# Altium footprint library ICs_VendorSpecific.PcbLib: 247 footprints (part 13 of 19)
Each footprint in its own frame and in the unit in brackets; x right, y up, seen from the top. Pads: shape width x height; smd on the part's side, far side on the other; paste and mask are expansions set on the pad; w line width, h text height; cw(c..) or ccw(c..) is an arc to the next point about the centre after c.
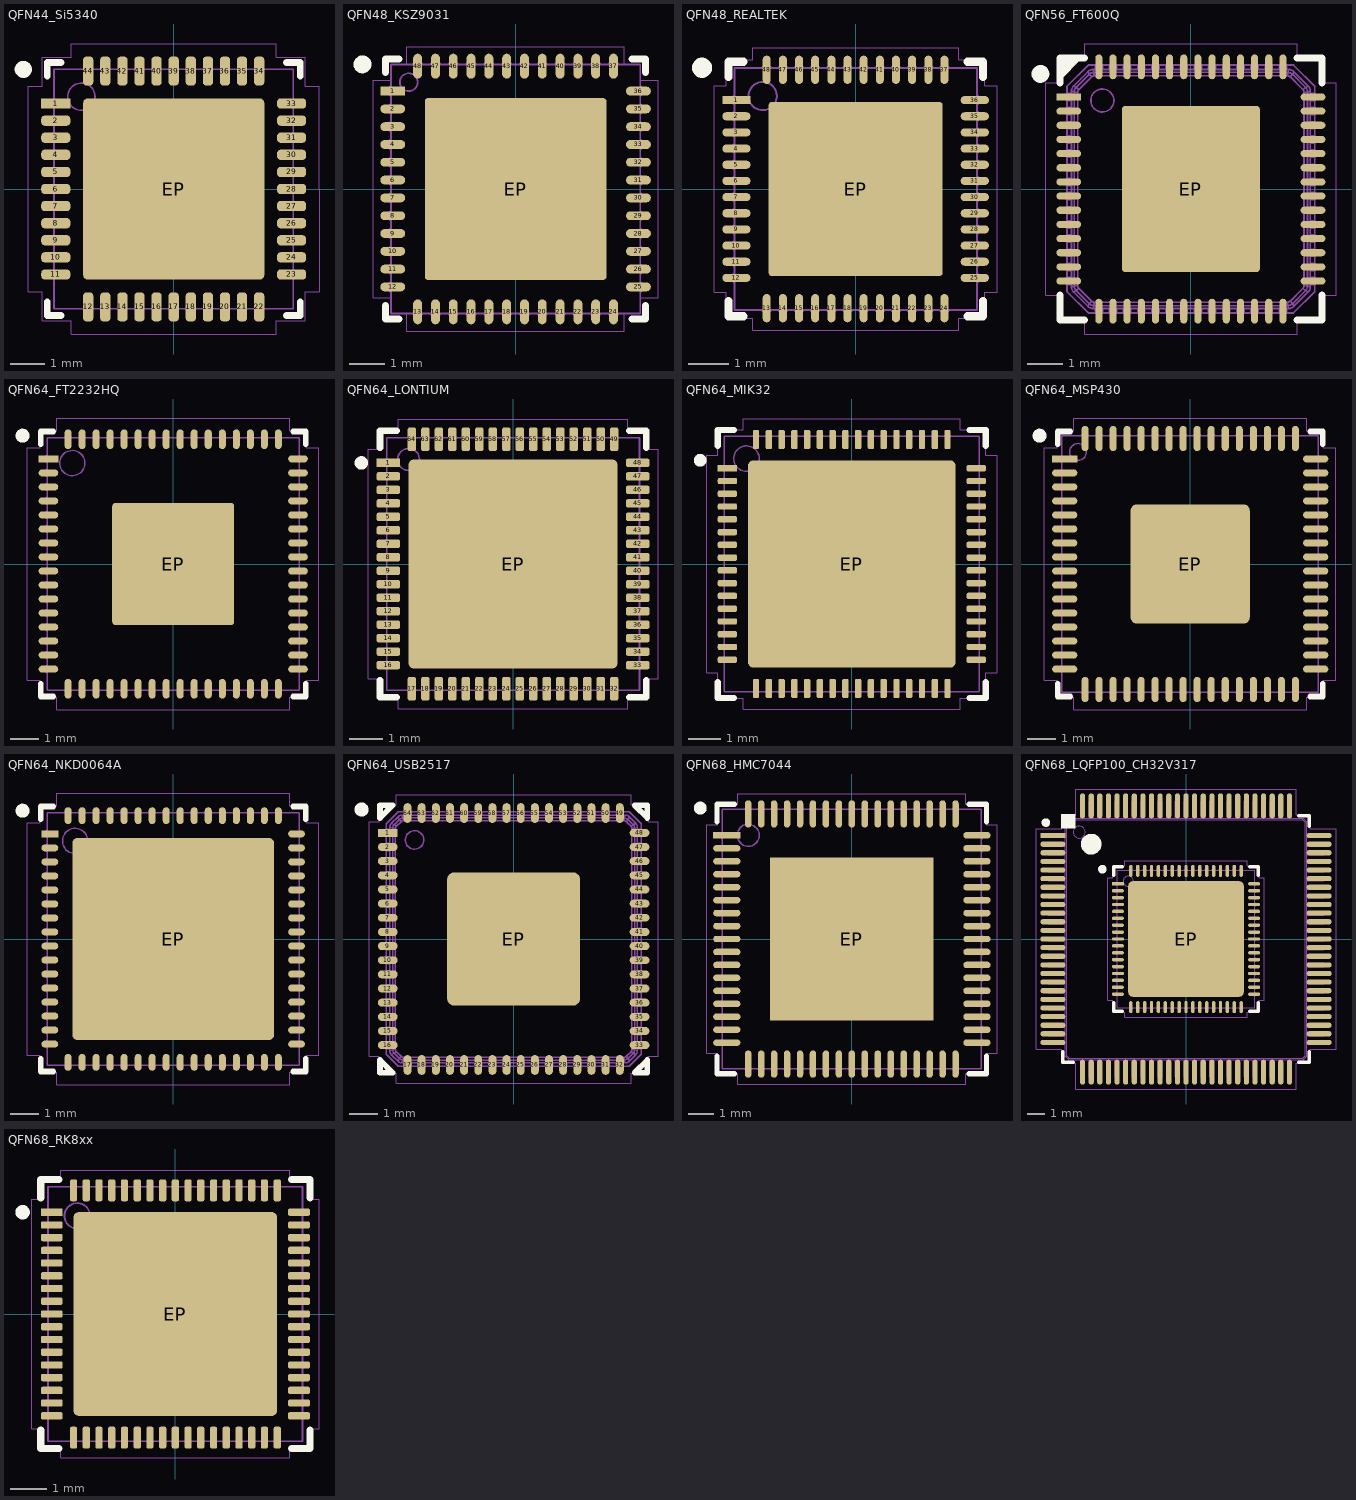
[diagram p12: the footprints below, top view; thin cyan lines are the x and y axes]

## QFN44_Si5340 [mm] "QFN, 44-Leads, Body 7x7mm, Pitch 0.50mm, Thermal Pad 5.20x5.20mm"
height 0.85
pads (45):
  rect 0.85x0.3 smd mask+0.05: 1(-3.45,2.5)
  rrect70% 0.85x0.3 smd mask+0.05: 2(-3.45,2) 3(-3.45,1.5) 4(-3.45,1) 5(-3.45,0.5) 6(-3.45,0) 7(-3.45,-0.5) 8(-3.45,-1) 9(-3.45,-1.5) 10(-3.45,-2) 11(-3.45,-2.5) 23(3.45,-2.5) 24(3.45,-2) 25(3.45,-1.5) 26(3.45,-1) 27(3.45,-0.5) 28(3.45,0) 29(3.45,0.5) 30(3.45,1) 31(3.45,1.5) 32(3.45,2) 33(3.45,2.5)
  rrect70% 0.3x0.85 smd mask+0.05: 12(-2.5,-3.45) 13(-2,-3.45) 14(-1.5,-3.45) 15(-1,-3.45) 16(-0.5,-3.45) 17(0,-3.45) 18(0.5,-3.45) 19(1,-3.45) 20(1.5,-3.45) 21(2,-3.45) 22(2.5,-3.45) 34(2.5,3.45) 35(2,3.45) 36(1.5,3.45) 37(1,3.45) 38(0.5,3.45) 39(0,3.45) 40(-0.5,3.45) 41(-1,3.45) 42(-1.5,3.45) 43(-2,3.45) 44(-2.5,3.45)
  rrect5% 5.3x5.3 smd paste-5 mask+0.05: EP(0,0)
Top Overlay:
  circle w0.25: c-4.4,3.5 r0.125
  lines w0.2: -3.7,-3.3 -3.7,-3.7 -3.3,-3.7 ; -3.7,3.3 -3.7,3.7 -3.3,3.7 ; 3.3,-3.7 3.7,-3.7 3.7,-3.3 ; 3.3,3.7 3.7,3.7 3.7,3.3
Top Paste:
  region: 1.15,-1.15 1.15,-0.15 0.15,-0.15 0.15,-1.15
  region: -0.15,-1.15 -0.15,-0.15 -1.15,-0.15 -1.15,-1.15
  region: -1.45,-1.15 -1.45,-0.15 -2.45,-0.15 -2.45,-1.15
  region: 2.45,-1.15 2.45,-0.15 1.45,-0.15 1.45,-1.15
  region: 1.15,0.15 1.15,1.15 0.15,1.15 0.15,0.15
  region: -0.15,0.15 -0.15,1.15 -1.15,1.15 -1.15,0.15
  region: -1.45,0.15 -1.45,1.15 -2.45,1.15 -2.45,0.15
  region: 2.45,0.15 2.45,1.15 1.45,1.15 1.45,0.15
  region: 1.15,1.45 1.15,2.45 0.15,2.45 0.15,1.45
  region: -0.15,1.45 -0.15,2.45 -1.15,2.45 -1.15,1.45
  region: -1.45,1.45 -1.45,2.45 -2.45,2.45 -2.45,1.45
  region: 2.45,1.45 2.45,2.45 1.45,2.45 1.45,1.45
  region: 1.15,-2.45 1.15,-1.45 0.15,-1.45 0.15,-2.45
  region: -0.15,-2.45 -0.15,-1.45 -1.15,-1.45 -1.15,-2.45
  region: -1.45,-2.45 -1.45,-1.45 -2.45,-1.45 -2.45,-2.45
  region: 2.45,-2.45 2.45,-1.45 1.45,-1.45 1.45,-2.45
Top Courtyard:
  lines w0.025: -4.25,-3 -4.25,3 -3.85,3 -3.85,3.85 -3,3.85 -3,4.25 3,4.25 3,3.85 3.85,3.85 3.85,3 4.25,3 4.25,-3 3.85,-3 3.85,-3.85 3,-3.85 3,-4.25 -3,-4.25 -3,-3.85 -3.85,-3.85 -3.85,-3 -4.25,-3
Top Assembly:
  circle w0.05: c-2.7,2.7 r0.4
  lines w0.05: -3.5,-2.625 -3.52,-2.625 -3.52,-2.375 -3.5,-2.375 ; -3.5,-2.125 -3.52,-2.125 -3.52,-1.875 -3.5,-1.875 ; -3.5,-1.625 -3.52,-1.625 -3.52,-1.375 -3.5,-1.375 ; -3.5,-1.125 -3.52,-1.125 -3.52,-0.875 -3.5,-0.875 ; -3.5,-0.625 -3.52,-0.625 -3.52,-0.375 -3.5,-0.375 ; -3.5,-0.125 -3.52,-0.125 -3.52,0.125 -3.5,0.125 ; -3.5,0.375 -3.52,0.375 -3.52,0.625 -3.5,0.625 ; -3.5,0.875 -3.52,0.875 -3.52,1.125 -3.5,1.125 ; -3.5,1.375 -3.52,1.375 -3.52,1.625 -3.5,1.625 ; -3.5,1.875 -3.52,1.875 -3.52,2.125 -3.5,2.125 ; -3.5,2.375 -3.52,2.375 -3.52,2.625 -3.5,2.625 ; -2.625,-3.5 -2.625,-3.52 -2.375,-3.52 -2.375,-3.5 ; -2.625,3.5 -2.625,3.52 -2.375,3.52 -2.375,3.5 ; -2.125,-3.5 -2.125,-3.52 -1.875,-3.52 -1.875,-3.5 ; -2.125,3.5 -2.125,3.52 -1.875,3.52 -1.875,3.5 ; -1.625,-3.5 -1.625,-3.52 -1.375,-3.52 -1.375,-3.5 ; -1.625,3.5 -1.625,3.52 -1.375,3.52 -1.375,3.5 ; -1.125,-3.5 -1.125,-3.52 -0.875,-3.52 -0.875,-3.5 ; -1.125,3.5 -1.125,3.52 -0.875,3.52 -0.875,3.5 ; -0.625,-3.5 -0.625,-3.52 -0.375,-3.52 -0.375,-3.5 ; -0.625,3.5 -0.625,3.52 -0.375,3.52 -0.375,3.5 ; -0.125,-3.5 -0.125,-3.52 0.125,-3.52 0.125,-3.5 ; -0.125,3.5 -0.125,3.52 0.125,3.52 0.125,3.5 ; 0.375,-3.5 0.375,-3.52 0.625,-3.52 0.625,-3.5 ; 0.375,3.5 0.375,3.52 0.625,3.52 0.625,3.5 ; 0.875,-3.5 0.875,-3.52 1.125,-3.52 1.125,-3.5 ; 0.875,3.5 0.875,3.52 1.125,3.52 1.125,3.5 ; 1.375,-3.5 1.375,-3.52 1.625,-3.52 1.625,-3.5 ; 1.375,3.5 1.375,3.52 1.625,3.52 1.625,3.5 ; 1.875,-3.5 1.875,-3.52 2.125,-3.52 2.125,-3.5 ; 1.875,3.5 1.875,3.52 2.125,3.52 2.125,3.5 ; 2.375,-3.5 2.375,-3.52 2.625,-3.52 2.625,-3.5 ; 2.375,3.5 2.375,3.52 2.625,3.52 2.625,3.5 ; 3.5,-2.625 3.52,-2.625 3.52,-2.375 3.5,-2.375 ; 3.5,-2.125 3.52,-2.125 3.52,-1.875 3.5,-1.875 ; 3.5,-1.625 3.52,-1.625 3.52,-1.375 3.5,-1.375 ; 3.5,-1.125 3.52,-1.125 3.52,-0.875 3.5,-0.875 ; 3.5,-0.625 3.52,-0.625 3.52,-0.375 3.5,-0.375 ; 3.5,-0.125 3.52,-0.125 3.52,0.125 3.5,0.125 ; 3.5,0.375 3.52,0.375 3.52,0.625 3.5,0.625 ; 3.5,0.875 3.52,0.875 3.52,1.125 3.5,1.125 ; 3.5,1.375 3.52,1.375 3.52,1.625 3.5,1.625 ; 3.5,1.875 3.52,1.875 3.52,2.125 3.5,2.125 ; 3.5,2.375 3.52,2.375 3.52,2.625 3.5,2.625 ; -3.5,-3.5 -3.5,3.5 3.5,3.5 3.5,-3.5 -3.5,-3.5
  text ".Designator" at -3.378,-0.339 h1.5
3D body "QFN44_Si5340A.x_t": height 0.87, standoff 0, extent -3.52,-3.52 3.52,3.52

## QFN48_KSZ9031 [mm] "QFN, 48-Leads, Body 7x7mm, Pitch 0.50mm, Thermal Pad 5.10x5.10mm. POD-Land Pattern drawing: QFN77-48LD-PL-1-C"
height 0.85
pads (49):
  rect 0.7x0.25 smd paste+0 mask+0.05: 1(-3.45,2.75)
  oval 0.7x0.25 smd paste+0 mask+0.05: 2(-3.45,2.25) 3(-3.45,1.75) 4(-3.45,1.25) 5(-3.45,0.75) 6(-3.45,0.25) 7(-3.45,-0.25) 8(-3.45,-0.75) 9(-3.45,-1.25) 10(-3.45,-1.75) 11(-3.45,-2.25) 12(-3.45,-2.75) 25(3.45,-2.75) 26(3.45,-2.25) 27(3.45,-1.75) 28(3.45,-1.25) 29(3.45,-0.75) 30(3.45,-0.25) 31(3.45,0.25) 32(3.45,0.75) 33(3.45,1.25) 34(3.45,1.75) 35(3.45,2.25) 36(3.45,2.75)
  oval 0.25x0.7 smd paste+0 mask+0.05: 13(-2.75,-3.45) 14(-2.25,-3.45) 15(-1.75,-3.45) 16(-1.25,-3.45) 17(-0.75,-3.45) 18(-0.25,-3.45) 19(0.25,-3.45) 20(0.75,-3.45) 21(1.25,-3.45) 22(1.75,-3.45) 23(2.25,-3.45) 24(2.75,-3.45) 37(2.75,3.45) 38(2.25,3.45) 39(1.75,3.45) 40(1.25,3.45) 41(0.75,3.45) 42(0.25,3.45) 43(-0.25,3.45) 44(-0.75,3.45) 45(-1.25,3.45) 46(-1.75,3.45) 47(-2.25,3.45) 48(-2.75,3.45)
  rrect3% 5.1x5.1 smd paste-50 mask+0.05: EP(0,0)
Top Overlay:
  circle w0.25: c-4.3,3.5 r0.125
  lines w0.2: -3.65,-3.275 -3.65,-3.65 -3.275,-3.65 ; -3.65,3.275 -3.65,3.65 -3.275,3.65 ; 3.275,-3.65 3.65,-3.65 3.65,-3.275 ; 3.275,3.65 3.65,3.65 3.65,3.275
Top Paste:
  region: 0.5,-0.5 0.5,0.5 -0.5,0.5 -0.5,-0.5
  region: -0.75,-0.5 -0.75,0.5 -1.75,0.5 -1.75,-0.5
  region: 1.75,-0.5 1.75,0.5 0.75,0.5 0.75,-0.5
  region: 1.75,0.75 1.75,1.75 0.75,1.75 0.75,0.75
  region: 0.5,0.75 0.5,1.75 -0.5,1.75 -0.5,0.75
  region: -0.75,0.75 -0.75,1.75 -1.75,1.75 -1.75,0.75
  region: 0.5,-1.75 0.5,-0.75 -0.5,-0.75 -0.5,-1.75
  region: -0.75,-1.75 -0.75,-0.75 -1.75,-0.75 -1.75,-1.75
  region: 1.75,-1.75 1.75,-0.75 0.75,-0.75 0.75,-1.75
Top Courtyard:
  lines w0.025: -4,-3.05 -3.5,-3.05 -3.5,-3.5 -3.05,-3.5 -3.05,-4 3.05,-4 3.05,-3.5 3.5,-3.5 3.5,-3.05 4,-3.05 4,3.05 3.5,3.05 3.5,3.5 3.05,3.5 3.05,4 -3.05,4 -3.05,3.5 -3.5,3.5 -3.5,3.05 -4,3.05 -4,-3.05
Top Assembly:
  circle w0.05: c-3,3 r0.25
  lines w0.05: -3.5,-2.875 -3.525,-2.875 -3.525,-2.625 -3.5,-2.625 ; -3.5,-2.375 -3.525,-2.375 -3.525,-2.125 -3.5,-2.125 ; -3.5,-1.875 -3.525,-1.875 -3.525,-1.625 -3.5,-1.625 ; -3.5,-1.375 -3.525,-1.375 -3.525,-1.125 -3.5,-1.125 ; -3.5,-0.875 -3.525,-0.875 -3.525,-0.625 -3.5,-0.625 ; -3.5,-0.375 -3.525,-0.375 -3.525,-0.125 -3.5,-0.125 ; -3.5,0.125 -3.525,0.125 -3.525,0.375 -3.5,0.375 ; -3.5,0.625 -3.525,0.625 -3.525,0.875 -3.5,0.875 ; -3.5,1.125 -3.525,1.125 -3.525,1.375 -3.5,1.375 ; -3.5,1.625 -3.525,1.625 -3.525,1.875 -3.5,1.875 ; -3.5,2.125 -3.525,2.125 -3.525,2.375 -3.5,2.375 ; -3.5,2.625 -3.525,2.625 -3.525,2.875 -3.5,2.875 ; -2.875,-3.5 -2.875,-3.525 -2.625,-3.525 -2.625,-3.5 ; -2.875,3.5 -2.875,3.525 -2.625,3.525 -2.625,3.5 ; -2.375,-3.5 -2.375,-3.525 -2.125,-3.525 -2.125,-3.5 ; -2.375,3.5 -2.375,3.525 -2.125,3.525 -2.125,3.5 ; -1.875,-3.5 -1.875,-3.525 -1.625,-3.525 -1.625,-3.5 ; -1.875,3.5 -1.875,3.525 -1.625,3.525 -1.625,3.5 ; -1.375,-3.5 -1.375,-3.525 -1.125,-3.525 -1.125,-3.5 ; -1.375,3.5 -1.375,3.525 -1.125,3.525 -1.125,3.5 ; -0.875,-3.5 -0.875,-3.525 -0.625,-3.525 -0.625,-3.5 ; -0.875,3.5 -0.875,3.525 -0.625,3.525 -0.625,3.5 ; -0.375,-3.5 -0.375,-3.525 -0.125,-3.525 -0.125,-3.5 ; -0.375,3.5 -0.375,3.525 -0.125,3.525 -0.125,3.5 ; 0.125,-3.5 0.125,-3.525 0.375,-3.525 0.375,-3.5 ; 0.125,3.5 0.125,3.525 0.375,3.525 0.375,3.5 ; 0.625,-3.5 0.625,-3.525 0.875,-3.525 0.875,-3.5 ; 0.625,3.5 0.625,3.525 0.875,3.525 0.875,3.5 ; 1.125,-3.5 1.125,-3.525 1.375,-3.525 1.375,-3.5 ; 1.125,3.5 1.125,3.525 1.375,3.525 1.375,3.5 ; 1.625,-3.5 1.625,-3.525 1.875,-3.525 1.875,-3.5 ; 1.625,3.5 1.625,3.525 1.875,3.525 1.875,3.5 ; 2.125,-3.5 2.125,-3.525 2.375,-3.525 2.375,-3.5 ; 2.125,3.5 2.125,3.525 2.375,3.525 2.375,3.5 ; 2.625,-3.5 2.625,-3.525 2.875,-3.525 2.875,-3.5 ; 2.625,3.5 2.625,3.525 2.875,3.525 2.875,3.5 ; 3.5,-2.875 3.525,-2.875 3.525,-2.625 3.5,-2.625 ; 3.5,-2.375 3.525,-2.375 3.525,-2.125 3.5,-2.125 ; 3.5,-1.875 3.525,-1.875 3.525,-1.625 3.5,-1.625 ; 3.5,-1.375 3.525,-1.375 3.525,-1.125 3.5,-1.125 ; 3.5,-0.875 3.525,-0.875 3.525,-0.625 3.5,-0.625 ; 3.5,-0.375 3.525,-0.375 3.525,-0.125 3.5,-0.125 ; 3.5,0.125 3.525,0.125 3.525,0.375 3.5,0.375 ; 3.5,0.625 3.525,0.625 3.525,0.875 3.5,0.875 ; 3.5,1.125 3.525,1.125 3.525,1.375 3.5,1.375 ; 3.5,1.625 3.525,1.625 3.525,1.875 3.5,1.875 ; 3.5,2.125 3.525,2.125 3.525,2.375 3.5,2.375 ; 3.5,2.625 3.525,2.625 3.525,2.875 3.5,2.875 ; -3.5,-3.5 3.5,-3.5 3.5,3.5 -3.5,3.5 -3.5,-3.5
  text ".Designator" at -4.511,-0.453 h2
3D body "QFN48_KSZ9031.x_t": height 0.88, standoff 0, extent -3.525,-3.525 3.525,3.525

## QFN48_REALTEK [mm] "QFN, 48-Leads, Body 6x6mm, Pitch 0.40mm, Thermal Pad 4.30x4.30mm. POD-Land Pattern drawing: QFN77-48LD-PL-1-C"
height 0.85
pads (49):
  rect 0.7x0.2 smd paste+0 mask+0.05: 1(-2.95,2.2)
  oval 0.7x0.2 smd paste+0 mask+0.05: 2(-2.95,1.8) 3(-2.95,1.4) 4(-2.95,1) 5(-2.95,0.6) 6(-2.95,0.2) 7(-2.95,-0.2) 8(-2.95,-0.6) 9(-2.95,-1) 10(-2.95,-1.4) 11(-2.95,-1.8) 12(-2.95,-2.2) 25(2.95,-2.2) 26(2.95,-1.8) 27(2.95,-1.4) 28(2.95,-1) 29(2.95,-0.6) 30(2.95,-0.2) 31(2.95,0.2) 32(2.95,0.6) 33(2.95,1) 34(2.95,1.4) 35(2.95,1.8) 36(2.95,2.2)
  oval 0.2x0.7 smd paste+0 mask+0.05: 13(-2.2,-2.95) 14(-1.8,-2.95) 15(-1.4,-2.95) 16(-1,-2.95) 17(-0.6,-2.95) 18(-0.2,-2.95) 19(0.2,-2.95) 20(0.6,-2.95) 21(1,-2.95) 22(1.4,-2.95) 23(1.8,-2.95) 24(2.2,-2.95) 37(2.2,2.95) 38(1.8,2.95) 39(1.4,2.95) 40(1,2.95) 41(0.6,2.95) 42(0.2,2.95) 43(-0.2,2.95) 44(-0.6,2.95) 45(-1,2.95) 46(-1.4,2.95) 47(-1.8,2.95) 48(-2.2,2.95)
  rrect3% 4.3x4.3 smd paste-50 mask+0.05: EP(0,0)
Top Overlay:
  circle w0.25: c-3.8,3 r0.125
  lines w0.2: -3.15,-2.775 -3.15,-3.15 -2.775,-3.15 ; -3.15,2.775 -3.15,3.15 -2.775,3.15 ; 2.775,-3.15 3.15,-3.15 3.15,-2.775 ; 2.775,3.15 3.15,3.15 3.15,2.775
Top Paste:
  region: 0.5,-0.5 0.5,0.5 -0.5,0.5 -0.5,-0.5
  region: -0.8,-0.5 -0.8,0.5 -1.8,0.5 -1.8,-0.5
  region: 1.8,-0.5 1.8,0.5 0.8,0.5 0.8,-0.5
  region: 1.8,0.8 1.8,1.8 0.8,1.8 0.8,0.8
  region: 0.5,0.8 0.5,1.8 -0.5,1.8 -0.5,0.8
  region: -0.8,0.8 -0.8,1.8 -1.8,1.8 -1.8,0.8
  region: 0.5,-1.8 0.5,-0.8 -0.5,-0.8 -0.5,-1.8
  region: -0.8,-1.8 -0.8,-0.8 -1.8,-0.8 -1.8,-1.8
  region: 1.8,-1.8 1.8,-0.8 0.8,-0.8 0.8,-1.8
Top Courtyard:
  lines w0.025: -3.5,-2.55 -3.2,-2.55 -3.2,-3.2 -2.55,-3.2 -2.55,-3.5 2.55,-3.5 2.55,-3.2 3.2,-3.2 3.2,-2.55 3.5,-2.55 3.5,2.55 3.2,2.55 3.2,3.2 2.55,3.2 2.55,3.5 -2.55,3.5 -2.55,3.2 -3.2,3.2 -3.2,2.55 -3.5,2.55 -3.5,-2.55
Top Assembly:
  circle w0.05: c-2.3,2.3 r0.35
  lines w0.05: -3,-2.3 -3.025,-2.3 -3.025,-2.1 -3,-2.1 ; -3,-1.9 -3.025,-1.9 -3.025,-1.7 -3,-1.7 ; -3,-1.5 -3.025,-1.5 -3.025,-1.3 -3,-1.3 ; -3,-1.1 -3.025,-1.1 -3.025,-0.9 -3,-0.9 ; -3,-0.7 -3.025,-0.7 -3.025,-0.5 -3,-0.5 ; -3,-0.3 -3.025,-0.3 -3.025,-0.1 -3,-0.1 ; -3,0.1 -3.025,0.1 -3.025,0.3 -3,0.3 ; -3,0.5 -3.025,0.5 -3.025,0.7 -3,0.7 ; -3,0.9 -3.025,0.9 -3.025,1.1 -3,1.1 ; -3,1.3 -3.025,1.3 -3.025,1.5 -3,1.5 ; -3,1.7 -3.025,1.7 -3.025,1.9 -3,1.9 ; -3,2.1 -3.025,2.1 -3.025,2.3 -3,2.3 ; -2.3,-3 -2.3,-3.025 -2.1,-3.025 -2.1,-3 ; -2.3,3 -2.3,3.025 -2.1,3.025 -2.1,3 ; -1.9,-3 -1.9,-3.025 -1.7,-3.025 -1.7,-3 ; -1.9,3 -1.9,3.025 -1.7,3.025 -1.7,3 ; -1.5,-3 -1.5,-3.025 -1.3,-3.025 -1.3,-3 ; -1.5,3 -1.5,3.025 -1.3,3.025 -1.3,3 ; -1.1,-3 -1.1,-3.025 -0.9,-3.025 -0.9,-3 ; -1.1,3 -1.1,3.025 -0.9,3.025 -0.9,3 ; -0.7,-3 -0.7,-3.025 -0.5,-3.025 -0.5,-3 ; -0.7,3 -0.7,3.025 -0.5,3.025 -0.5,3 ; -0.3,-3 -0.3,-3.025 -0.1,-3.025 -0.1,-3 ; -0.3,3 -0.3,3.025 -0.1,3.025 -0.1,3 ; 0.1,-3 0.1,-3.025 0.3,-3.025 0.3,-3 ; 0.1,3 0.1,3.025 0.3,3.025 0.3,3 ; 0.5,-3 0.5,-3.025 0.7,-3.025 0.7,-3 ; 0.5,3 0.5,3.025 0.7,3.025 0.7,3 ; 0.9,-3 0.9,-3.025 1.1,-3.025 1.1,-3 ; 0.9,3 0.9,3.025 1.1,3.025 1.1,3 ; 1.3,-3 1.3,-3.025 1.5,-3.025 1.5,-3 ; 1.3,3 1.3,3.025 1.5,3.025 1.5,3 ; 1.7,-3 1.7,-3.025 1.9,-3.025 1.9,-3 ; 1.7,3 1.7,3.025 1.9,3.025 1.9,3 ; 2.1,-3 2.1,-3.025 2.3,-3.025 2.3,-3 ; 2.1,3 2.1,3.025 2.3,3.025 2.3,3 ; 3,-2.3 3.025,-2.3 3.025,-2.1 3,-2.1 ; 3,-1.9 3.025,-1.9 3.025,-1.7 3,-1.7 ; 3,-1.5 3.025,-1.5 3.025,-1.3 3,-1.3 ; 3,-1.1 3.025,-1.1 3.025,-0.9 3,-0.9 ; 3,-0.7 3.025,-0.7 3.025,-0.5 3,-0.5 ; 3,-0.3 3.025,-0.3 3.025,-0.1 3,-0.1 ; 3,0.1 3.025,0.1 3.025,0.3 3,0.3 ; 3,0.5 3.025,0.5 3.025,0.7 3,0.7 ; 3,0.9 3.025,0.9 3.025,1.1 3,1.1 ; 3,1.3 3.025,1.3 3.025,1.5 3,1.5 ; 3,1.7 3.025,1.7 3.025,1.9 3,1.9 ; 3,2.1 3.025,2.1 3.025,2.3 3,2.3 ; -3,-3 3,-3 3,3 -3,3 -3,-3
  text ".Designator" at -4.511,-0.453 h2
3D body "QFN48_Realtek_X_T.x_t": height 0.9, standoff 0, extent -3.025,-3.025 3.025,3.025

## QFN56_FT600Q [mm] "QFN56, 7x7mm with 0.4mm pitch"
height 0.9
pads (57):
  rect 0.7x0.2 smd paste+0 mask+0.05: 1(-3.45,2.6)
  oval 0.7x0.2 smd paste+0 mask+0.05: 2(-3.45,2.2) 3(-3.45,1.8) 4(-3.45,1.4) 5(-3.45,1) 6(-3.45,0.6) 7(-3.45,0.2) 8(-3.45,-0.2) 9(-3.45,-0.6) 10(-3.45,-1) 11(-3.45,-1.4) 12(-3.45,-1.8) 13(-3.45,-2.2) 14(-3.45,-2.6) 29(3.45,-2.6) 30(3.45,-2.2) 31(3.45,-1.8) 32(3.45,-1.4) 33(3.45,-1) 34(3.45,-0.6) 35(3.45,-0.2) 36(3.45,0.2) 37(3.45,0.6) 38(3.45,1) 39(3.45,1.4) 40(3.45,1.8) 41(3.45,2.2) 42(3.45,2.6)
  oval 0.2x0.7 smd paste+0 mask+0.05: 15(-2.6,-3.45) 16(-2.2,-3.45) 17(-1.8,-3.45) 18(-1.4,-3.45) 19(-1,-3.45) 20(-0.6,-3.45) 21(-0.2,-3.45) 22(0.2,-3.45) 23(0.6,-3.45) 24(1,-3.45) 25(1.4,-3.45) 26(1.8,-3.45) 27(2.2,-3.45) 28(2.6,-3.45) 43(2.6,3.45) 44(2.2,3.45) 45(1.8,3.45) 46(1.4,3.45) 47(1,3.45) 48(0.6,3.45) 49(0.2,3.45) 50(-0.2,3.45) 51(-0.6,3.45) 52(-1,3.45) 53(-1.4,3.45) 54(-1.8,3.45) 55(-2.2,3.45) 56(-2.6,3.45)
  rrect5% 3.9x4.7 smd paste-50 mask+0.05: EP(0,0)
Top Overlay:
  circle w0.25: c-4.25,3.25 r0.125
  lines w0.2: -3.7,-3 -3.7,-3.7 -3,-3.7 ; -3.7,3 -3.7,3.7 -3,3.7 ; -3.7,3.2 -3.2,3.7 ; -3.7,3.4 -3.417,3.683 ; 3,-3.7 3.7,-3.7 3.7,-3 ; 3,3.7 3.7,3.7 3.7,3
Top Paste:
  region: 0.75,0.3 0.15,0.3 0.15,-0.3 0.75,-0.3
  region: 1.65,0.3 1.05,0.3 1.05,-0.3 1.65,-0.3
  region: -0.15,0.3 -0.75,0.3 -0.75,-0.3 -0.15,-0.3
  region: -1.05,0.3 -1.65,0.3 -1.65,-0.3 -1.05,-0.3
  region: 0.75,1.2 0.15,1.2 0.15,0.6 0.75,0.6
  region: 1.65,1.2 1.05,1.2 1.05,0.6 1.65,0.6
  region: -0.15,1.2 -0.75,1.2 -0.75,0.6 -0.15,0.6
  region: -1.05,1.2 -1.65,1.2 -1.65,0.6 -1.05,0.6
  region: -1.05,2.1 -1.65,2.1 -1.65,1.5 -1.05,1.5
  region: -0.15,2.1 -0.75,2.1 -0.75,1.5 -0.15,1.5
  region: 0.75,2.1 0.15,2.1 0.15,1.5 0.75,1.5
  region: 1.65,2.1 1.05,2.1 1.05,1.5 1.65,1.5
  region: 0.75,-0.6 0.15,-0.6 0.15,-1.2 0.75,-1.2
  region: 1.65,-0.6 1.05,-0.6 1.05,-1.2 1.65,-1.2
  region: -0.15,-0.6 -0.75,-0.6 -0.75,-1.2 -0.15,-1.2
  region: -1.05,-0.6 -1.65,-0.6 -1.65,-1.2 -1.05,-1.2
  region: 0.75,-1.5 0.15,-1.5 0.15,-2.1 0.75,-2.1
  region: 1.65,-1.5 1.05,-1.5 1.05,-2.1 1.65,-2.1
  region: -0.15,-1.5 -0.75,-1.5 -0.75,-2.1 -0.15,-2.1
  region: -1.05,-1.5 -1.65,-1.5 -1.65,-2.1 -1.05,-2.1
Top Courtyard:
  lines w0.025: -4.1,-3 -3.7,-3 -3.7,-3.7 -3,-3.7 -3,-4.1 3,-4.1 3,-3.7 3.7,-3.7 3.7,-3 4.1,-3 4.1,3 3.7,3 3.7,3.7 3,3.7 3,4.1 -3,4.1 -3,3.7 -3.7,3.7 -3.7,3 -4.1,3 -4.1,-3
Top Assembly:
  drawing of 313 lines, arcs and shapes, not listed
  text ".Designator" at -4.511,-0.453 h2
3D body "QFN56_FT600_X_T.x_t": height 0.91, standoff 0, extent -3.51,-3.51 3.51,3.51

## QFN64_FT2232HQ [mm] "QFN64 9mm x 9mm, 0.5mm pitch"
height 0.9
pads (65):
  rect 0.7x0.25 smd paste+0 mask+0.05: 1(-4.45,3.75)
  oval 0.7x0.25 smd paste+0 mask+0.05: 2(-4.45,3.25) 3(-4.45,2.75) 4(-4.45,2.25) 5(-4.45,1.75) 6(-4.45,1.25) 7(-4.45,0.75) 8(-4.45,0.25) 9(-4.45,-0.25) 10(-4.45,-0.75) 11(-4.45,-1.25) 12(-4.45,-1.75) 13(-4.45,-2.25) 14(-4.45,-2.75) 15(-4.45,-3.25) 16(-4.45,-3.75) 33(4.45,-3.75) 34(4.45,-3.25) 35(4.45,-2.75) 36(4.45,-2.25) 37(4.45,-1.75) 38(4.45,-1.25) 39(4.45,-0.75) 40(4.45,-0.25) 41(4.45,0.25) 42(4.45,0.75) 43(4.45,1.25) 44(4.45,1.75) 45(4.45,2.25) 46(4.45,2.75) 47(4.45,3.25) 48(4.45,3.75)
  oval 0.25x0.7 smd paste+0 mask+0.05: 17(-3.75,-4.45) 18(-3.25,-4.45) 19(-2.75,-4.45) 20(-2.25,-4.45) 21(-1.75,-4.45) 22(-1.25,-4.45) 23(-0.75,-4.45) 24(-0.25,-4.45) 25(0.25,-4.45) 26(0.75,-4.45) 27(1.25,-4.45) 28(1.75,-4.45) 29(2.25,-4.45) 30(2.75,-4.45) 31(3.25,-4.45) 32(3.75,-4.45) 49(3.75,4.45) 50(3.25,4.45) 51(2.75,4.45) 52(2.25,4.45) 53(1.75,4.45) 54(1.25,4.45) 55(0.75,4.45) 56(0.25,4.45) 57(-0.25,4.45) 58(-0.75,4.45) 59(-1.25,4.45) 60(-1.75,4.45) 61(-2.25,4.45) 62(-2.75,4.45) 63(-3.25,4.45) 64(-3.75,4.45)
  rrect5% 4.35x4.35 smd paste-50 mask+0.05: EP(0,0)
Top Overlay:
  circle w0.25: c-5.375,4.575 r0.125
  lines w0.2: -4.725,-4.275 -4.725,-4.725 -4.275,-4.725 ; -4.725,4.275 -4.725,4.725 -4.275,4.725 ; 4.275,-4.725 4.725,-4.725 4.725,-4.275 ; 4.275,4.725 4.725,4.725 4.725,4.275
Top Paste:
  region: 1.25,-1.25 1.25,-2.05 2.05,-2.05 2.05,-1.25
  region: 0.15,-1.25 0.15,-2.05 0.95,-2.05 0.95,-1.25
  region: -2.05,-1.25 -2.05,-2.05 -1.25,-2.05 -1.25,-1.25
  region: -0.95,-1.25 -0.95,-2.05 -0.15,-2.05 -0.15,-1.25
  region: 1.25,-0.15 1.25,-0.95 2.05,-0.95 2.05,-0.15
  region: 0.15,-0.15 0.15,-0.95 0.95,-0.95 0.95,-0.15
  region: -2.05,-0.15 -2.05,-0.95 -1.25,-0.95 -1.25,-0.15
  region: -0.95,-0.15 -0.95,-0.95 -0.15,-0.95 -0.15,-0.15
  region: 1.25,2.05 1.25,1.25 2.05,1.25 2.05,2.05
  region: 0.15,2.05 0.15,1.25 0.95,1.25 0.95,2.05
  region: -2.05,2.05 -2.05,1.25 -1.25,1.25 -1.25,2.05
  region: -0.95,2.05 -0.95,1.25 -0.15,1.25 -0.15,2.05
  region: 1.25,0.95 1.25,0.15 2.05,0.15 2.05,0.95
  region: 0.15,0.95 0.15,0.15 0.95,0.15 0.95,0.95
  region: -2.05,0.95 -2.05,0.15 -1.25,0.15 -1.25,0.95
  region: -0.95,0.95 -0.95,0.15 -0.15,0.15 -0.15,0.95
Top Courtyard:
  lines w0.025: -5.2,-4.15 -4.75,-4.15 -4.75,-4.75 -4.15,-4.75 -4.15,-5.2 4.15,-5.2 4.15,-4.75 4.75,-4.75 4.75,-4.15 5.2,-4.15 5.2,4.15 4.75,4.15 4.75,4.75 4.15,4.75 4.15,5.2 -4.15,5.2 -4.15,4.75 -4.75,4.75 -4.75,4.15 -5.2,4.15 -5.2,-4.15
Top Assembly:
  drawing of 197 lines, arcs and shapes, not listed
  text ".Designator" at -6.763,-0.679 h3
3D body "QFN64_FT2232HQ_X_T.x_t": height 0.92, standoff 0, extent -4.52,-4.52 4.52,4.52

## QFN64_LONTIUM [mm] "QFN 7.5mm x 7.5mm, 0.4mm pitch"
height 0.85
pads (65):
  rect 0.7x0.25 smd paste-0.025 mask+0.05: 1(-3.7,3)
  rrect50% 0.7x0.25 smd paste-0.025 mask+0.05: 2(-3.7,2.6) 3(-3.7,2.2) 4(-3.7,1.8) 5(-3.7,1.4) 6(-3.7,1) 7(-3.7,0.6) 8(-3.7,0.2) 9(-3.7,-0.2) 10(-3.7,-0.6) 11(-3.7,-1) 12(-3.7,-1.4) 13(-3.7,-1.8) 14(-3.7,-2.2) 15(-3.7,-2.6) 16(-3.7,-3) 33(3.7,-3) 34(3.7,-2.6) 35(3.7,-2.2) 36(3.7,-1.8) 37(3.7,-1.4) 38(3.7,-1) 39(3.7,-0.6) 40(3.7,-0.2) 41(3.7,0.2) 42(3.7,0.6) 43(3.7,1) 44(3.7,1.4) 45(3.7,1.8) 46(3.7,2.2) 47(3.7,2.6) 48(3.7,3)
  rrect50% 0.25x0.7 smd paste-0.025 mask+0.05: 17(-3,-3.7) 18(-2.6,-3.7) 19(-2.2,-3.7) 20(-1.8,-3.7) 21(-1.4,-3.7) 22(-1,-3.7) 23(-0.6,-3.7) 24(-0.2,-3.7) 25(0.2,-3.7) 26(0.6,-3.7) 27(1,-3.7) 28(1.4,-3.7) 29(1.8,-3.7) 30(2.2,-3.7) 31(2.6,-3.7) 32(3,-3.7) 49(3,3.7) 50(2.6,3.7) 51(2.2,3.7) 52(1.8,3.7) 53(1.4,3.7) 54(1,3.7) 55(0.6,3.7) 56(0.2,3.7) 57(-0.2,3.7) 58(-0.6,3.7) 59(-1,3.7) 60(-1.4,3.7) 61(-1.8,3.7) 62(-2.2,3.7) 63(-2.6,3.7) 64(-3,3.7)
  rrect5% 6.2x6.2 smd paste-4 mask+0.05: EP(0,0)
Top Overlay:
  circle w0.2: c-4.5,3 r0.1
  lines w0.2: -3.95,-3.45 -3.95,-3.95 -3.45,-3.95 ; -3.95,3.45 -3.95,3.95 -3.45,3.95 ; 3.45,-3.95 3.95,-3.95 3.95,-3.45 ; 3.45,3.95 3.95,3.95 3.95,3.45
Top Paste:
  region: 0.4,0.4 -0.4,0.4 -0.4,-0.4 0.4,-0.4
  region: -0.7,0.4 -1.5,0.4 -1.5,-0.4 -0.7,-0.4
  region: -1.8,0.4 -2.6,0.4 -2.6,-0.4 -1.8,-0.4
  region: -2.6,-0.7 -2.6,-1.5 -1.8,-1.5 -1.8,-0.7
  region: -2.6,-1.8 -2.6,-2.6 -1.8,-2.6 -1.8,-1.8
  rectangle: -1.5,-2.6 -0.7,-1.8
  rectangle: -1.5,-1.5 -0.7,-0.7
  rectangle: -0.4,-1.5 0.4,-0.7
  rectangle: -0.4,-2.6 0.4,-1.8
  rectangle: 0.7,-0.4 1.5,0.4
  rectangle: 1.8,-0.4 2.6,0.4
  region: 1.8,-0.7 1.8,-1.5 2.6,-1.5 2.6,-0.7
  region: 1.8,-1.8 1.8,-2.6 2.6,-2.6 2.6,-1.8
  region: 1.5,-1.8 0.7,-1.8 0.7,-2.6 1.5,-2.6
  region: 1.5,-0.7 0.7,-0.7 0.7,-1.5 1.5,-1.5
  region: -1.8,0.7 -1.8,1.5 -2.6,1.5 -2.6,0.7
  region: -1.8,1.8 -1.8,2.6 -2.6,2.6 -2.6,1.8
  rectangle: -1.5,1.8 -0.7,2.6
  rectangle: -0.4,1.8 0.4,2.6
  region: -0.4,1.5 -0.4,0.7 0.4,0.7 0.4,1.5
  region: -1.5,1.5 -1.5,0.7 -0.7,0.7 -0.7,1.5
  rectangle: 0.7,1.8 1.5,2.6
  rectangle: 1.8,1.8 2.6,2.6
  region: 1.8,1.5 1.8,0.7 2.6,0.7 2.6,1.5
  region: 1.5,1.5 0.7,1.5 0.7,0.7 1.5,0.7
Top Courtyard:
  lines w0.025: -4.3,-3.4 -4.3,3.4 -3.95,3.4 -3.95,3.95 -3.4,3.95 -3.4,4.3 3.4,4.3 3.4,3.95 3.95,3.95 3.95,3.4 4.3,3.4 4.3,-3.4 3.95,-3.4 3.95,-3.95 3.4,-3.95 3.4,-4.3 -3.4,-4.3 -3.4,-3.95 -3.95,-3.95 -3.95,-3.4 -4.3,-3.4
Top Assembly:
  drawing of 197 lines, arcs and shapes, not listed
  text ".Designator" at -6.763,-0.679 h3
3D body "QFN64_Lontium.x_t": height 0.8, standoff 0, extent -3.775,-3.775 3.775,3.775

## QFN64_MIK32 [mm] "QFN 8mm x 8mm, 0.4mm pitch"
height 0.7
pads (65):
  rect 0.6x0.2 smd paste-0.01 mask+0.05: 1(-3.9,3)
  rrect50% 0.6x0.2 smd paste-0.01 mask+0.05: 2(-3.9,2.6) 3(-3.9,2.2) 4(-3.9,1.8) 5(-3.9,1.4) 6(-3.9,1) 7(-3.9,0.6) 8(-3.9,0.2) 9(-3.9,-0.2) 10(-3.9,-0.6) 11(-3.9,-1) 12(-3.9,-1.4) 13(-3.9,-1.8) 14(-3.9,-2.2) 15(-3.9,-2.6) 16(-3.9,-3) 33(3.9,-3) 34(3.9,-2.6) 35(3.9,-2.2) 36(3.9,-1.8) 37(3.9,-1.4) 38(3.9,-1) 39(3.9,-0.6) 40(3.9,-0.2) 41(3.9,0.2) 42(3.9,0.6) 43(3.9,1) 44(3.9,1.4) 45(3.9,1.8) 46(3.9,2.2) 47(3.9,2.6) 48(3.9,3)
  rrect50% 0.2x0.6 smd paste-0.01 mask+0.05: 17(-3,-3.9) 18(-2.6,-3.9) 19(-2.2,-3.9) 20(-1.8,-3.9) 21(-1.4,-3.9) 22(-1,-3.9) 23(-0.6,-3.9) 24(-0.2,-3.9) 25(0.2,-3.9) 26(0.6,-3.9) 27(1,-3.9) 28(1.4,-3.9) 29(1.8,-3.9) 30(2.2,-3.9) 31(2.6,-3.9) 32(3,-3.9) 49(3,3.9) 50(2.6,3.9) 51(2.2,3.9) 52(1.8,3.9) 53(1.4,3.9) 54(1,3.9) 55(0.6,3.9) 56(0.2,3.9) 57(-0.2,3.9) 58(-0.6,3.9) 59(-1,3.9) 60(-1.4,3.9) 61(-1.8,3.9) 62(-2.2,3.9) 63(-2.6,3.9) 64(-3,3.9)
  rrect5% 6.5x6.5 smd paste-4 mask+0.05: EP(0,0)
Top Overlay:
  circle w0.2: c-4.75,3.25 r0.1
  lines w0.2: -4.2,-3.7 -4.2,-4.2 -3.7,-4.2 ; -4.2,3.7 -4.2,4.2 -3.7,4.2 ; 3.7,-4.2 4.2,-4.2 4.2,-3.7 ; 3.7,4.2 4.2,4.2 4.2,3.7
Top Paste:
  region: 1.8,1.8 0.8,1.8 0.8,0.8 1.8,0.8
  region: 2.1,1.8 2.1,0.8 3.1,0.8 3.1,1.8
  rectangle: 2.1,2.1 3.1,3.1
  rectangle: 0.8,2.1 1.8,3.1
  region: -1.8,1.8 -1.8,0.8 -0.8,0.8 -0.8,1.8
  region: -0.5,1.8 -0.5,0.8 0.5,0.8 0.5,1.8
  rectangle: -0.5,2.1 0.5,3.1
  rectangle: -1.8,2.1 -0.8,3.1
  region: -2.1,2.1 -2.1,3.1 -3.1,3.1 -3.1,2.1
  region: -2.1,0.8 -2.1,1.8 -3.1,1.8 -3.1,0.8
  region: 1.8,-0.8 0.8,-0.8 0.8,-1.8 1.8,-1.8
  region: 1.8,-2.1 0.8,-2.1 0.8,-3.1 1.8,-3.1
  region: 2.1,-2.1 2.1,-3.1 3.1,-3.1 3.1,-2.1
  region: 2.1,-0.8 2.1,-1.8 3.1,-1.8 3.1,-0.8
  rectangle: 2.1,-0.5 3.1,0.5
  rectangle: 0.8,-0.5 1.8,0.5
  rectangle: -0.5,-3.1 0.5,-2.1
  rectangle: -0.5,-1.8 0.5,-0.8
  rectangle: -1.8,-1.8 -0.8,-0.8
  rectangle: -1.8,-3.1 -0.8,-2.1
  region: -3.1,-2.1 -3.1,-3.1 -2.1,-3.1 -2.1,-2.1
  region: -3.1,-0.8 -3.1,-1.8 -2.1,-1.8 -2.1,-0.8
  region: -2.1,0.5 -3.1,0.5 -3.1,-0.5 -2.1,-0.5
  region: -0.8,0.5 -1.8,0.5 -1.8,-0.5 -0.8,-0.5
  region: 0.5,0.5 -0.5,0.5 -0.5,-0.5 0.5,-0.5
Top Courtyard:
  lines w0.025: -4.55,-3.4 -4.2,-3.4 -4.2,-4.2 -3.4,-4.2 -3.4,-4.55 3.4,-4.55 3.4,-4.2 4.2,-4.2 4.2,-3.4 4.55,-3.4 4.55,3.4 4.2,3.4 4.2,4.2 3.4,4.2 3.4,4.55 -3.4,4.55 -3.4,4.2 -4.2,4.2 -4.2,3.4 -4.55,3.4 -4.55,-3.4
Top Assembly:
  drawing of 197 lines, arcs and shapes, not listed
  text ".Designator" at -6.763,-0.679 h3
3D body "MIK32_Amur_X_T.x_t": height 0.71, standoff 0, extent -4.01,-4.01 4.01,4.01

## QFN64_MSP430 [mm] "QFN64 9mm x 9mm, 0.5mm pitch"
height 1
pads (65):
  rect 0.9x0.25 smd paste+0 mask+0.05: 1(-4.475,3.75)
  oval 0.9x0.25 smd paste+0 mask+0.05: 2(-4.475,3.25) 3(-4.475,2.75) 4(-4.475,2.25) 5(-4.475,1.75) 6(-4.475,1.25) 7(-4.475,0.75) 8(-4.475,0.25) 9(-4.475,-0.25) 10(-4.475,-0.75) 11(-4.475,-1.25) 12(-4.475,-1.75) 13(-4.475,-2.25) 14(-4.475,-2.75) 15(-4.475,-3.25) 16(-4.475,-3.75) 33(4.475,-3.75) 34(4.475,-3.25) 35(4.475,-2.75) 36(4.475,-2.25) 37(4.475,-1.75) 38(4.475,-1.25) 39(4.475,-0.75) 40(4.475,-0.25) 41(4.475,0.25) 42(4.475,0.75) 43(4.475,1.25) 44(4.475,1.75) 45(4.475,2.25) 46(4.475,2.75) 47(4.475,3.25) 48(4.475,3.75)
  oval 0.25x0.9 smd paste+0 mask+0.05: 17(-3.75,-4.475) 18(-3.25,-4.475) 19(-2.75,-4.475) 20(-2.25,-4.475) 21(-1.75,-4.475) 22(-1.25,-4.475) 23(-0.75,-4.475) 24(-0.25,-4.475) 25(0.25,-4.475) 26(0.75,-4.475) 27(1.25,-4.475) 28(1.75,-4.475) 29(2.25,-4.475) 30(2.75,-4.475) 31(3.25,-4.475) 32(3.75,-4.475) 49(3.75,4.475) 50(3.25,4.475) 51(2.75,4.475) 52(2.25,4.475) 53(1.75,4.475) 54(1.25,4.475) 55(0.75,4.475) 56(0.25,4.475) 57(-0.25,4.475) 58(-0.75,4.475) 59(-1.25,4.475) 60(-1.75,4.475) 61(-2.25,4.475) 62(-2.75,4.475) 63(-3.25,4.475) 64(-3.75,4.475)
  rrect10% 4.25x4.25 smd paste-50 mask+0.05: EP(0,0)
Top Overlay:
  circle w0.25: c-5.375,4.575 r0.125
  lines w0.2: -4.725,-4.275 -4.725,-4.725 -4.275,-4.725 ; -4.725,4.275 -4.725,4.725 -4.275,4.725 ; 4.275,-4.725 4.725,-4.725 4.725,-4.275 ; 4.275,4.725 4.725,4.725 4.725,4.275
Top Paste:
  region: 0.6,-0.6 0.6,-0.1 0.1,-0.1 0.1,-0.6
  region: -0.1,-0.6 -0.1,-0.1 -0.6,-0.1 -0.6,-0.6
  region: -0.6,0.6 -0.6,0.1 -0.1,0.1 -0.1,0.6
  region: 0.1,0.6 0.1,0.1 0.6,0.1 0.6,0.6
  region: -0.8,-0.6 -0.8,-0.1 -1.3,-0.1 -1.3,-0.6
  region: -1.5,-0.6 -1.5,-0.1 -2,-0.1 -2,-0.6
  region: -2,0.6 -2,0.1 -1.5,0.1 -1.5,0.6
  region: -1.3,0.6 -1.3,0.1 -0.8,0.1 -0.8,0.6
  region: 2,-0.6 2,-0.1 1.5,-0.1 1.5,-0.6
  region: 1.3,-0.6 1.3,-0.1 0.8,-0.1 0.8,-0.6
  region: 0.8,0.6 0.8,0.1 1.3,0.1 1.3,0.6
  region: 1.5,0.6 1.5,0.1 2,0.1 2,0.6
  region: 0.6,0.8 0.6,1.3 0.1,1.3 0.1,0.8
  region: -0.1,0.8 -0.1,1.3 -0.6,1.3 -0.6,0.8
  region: -0.6,2 -0.6,1.5 -0.1,1.5 -0.1,2
  region: 0.1,2 0.1,1.5 0.6,1.5 0.6,2
  region: -0.8,0.8 -0.8,1.3 -1.3,1.3 -1.3,0.8
  region: -1.5,0.8 -1.5,1.3 -2,1.3 -2,0.8
  region: -2,2 -2,1.5 -1.5,1.5 -1.5,2
  region: -1.3,2 -1.3,1.5 -0.8,1.5 -0.8,2
  region: 2,0.8 2,1.3 1.5,1.3 1.5,0.8
  region: 1.3,0.8 1.3,1.3 0.8,1.3 0.8,0.8
  region: 0.8,2 0.8,1.5 1.3,1.5 1.3,2
  region: 1.5,2 1.5,1.5 2,1.5 2,2
  region: 0.6,-2 0.6,-1.5 0.1,-1.5 0.1,-2
  region: -0.1,-2 -0.1,-1.5 -0.6,-1.5 -0.6,-2
  region: -0.6,-0.8 -0.6,-1.3 -0.1,-1.3 -0.1,-0.8
  region: 0.1,-0.8 0.1,-1.3 0.6,-1.3 0.6,-0.8
  region: -0.8,-2 -0.8,-1.5 -1.3,-1.5 -1.3,-2
  region: -1.5,-2 -1.5,-1.5 -2,-1.5 -2,-2
  region: -2,-0.8 -2,-1.3 -1.5,-1.3 -1.5,-0.8
  region: -1.3,-0.8 -1.3,-1.3 -0.8,-1.3 -0.8,-0.8
  region: 2,-2 2,-1.5 1.5,-1.5 1.5,-2
  region: 1.3,-2 1.3,-1.5 0.8,-1.5 0.8,-2
  region: 0.8,-0.8 0.8,-1.3 1.3,-1.3 1.3,-0.8
  region: 1.5,-0.8 1.5,-1.3 2,-1.3 2,-0.8
Top Courtyard:
  lines w0.025: -5.2,-4.15 -4.75,-4.15 -4.75,-4.75 -4.15,-4.75 -4.15,-5.2 4.15,-5.2 4.15,-4.75 4.75,-4.75 4.75,-4.15 5.2,-4.15 5.2,4.15 4.75,4.15 4.75,4.75 4.15,4.75 4.15,5.2 -4.15,5.2 -4.15,4.75 -4.75,4.75 -4.75,4.15 -5.2,4.15 -5.2,-4.15
Top Assembly:
  drawing of 197 lines, arcs and shapes, not listed
  text ".Designator" at -6.763,-0.679 h3
3D body "RGC0064B.x_t": height 1.05, standoff 0, extent -4.525,-4.525 4.525,4.525

## QFN64_NKD0064A [mm] "QFN, 64-Leads, Body 9x9mm, Pitch 0.50mm, Thermal Pad 7.20x7.20mm."
height 0.8
pads (65):
  rect 0.6x0.25 smd paste+0 mask+0.05: 1(-4.4,3.75)
  oval 0.6x0.25 smd paste+0 mask+0.05: 2(-4.4,3.25) 3(-4.4,2.75) 4(-4.4,2.25) 5(-4.4,1.75) 6(-4.4,1.25) 7(-4.4,0.75) 8(-4.4,0.25) 9(-4.4,-0.25) 10(-4.4,-0.75) 11(-4.4,-1.25) 12(-4.4,-1.75) 13(-4.4,-2.25) 14(-4.4,-2.75) 15(-4.4,-3.25) 16(-4.4,-3.75) 33(4.4,-3.75) 34(4.4,-3.25) 35(4.4,-2.75) 36(4.4,-2.25) 37(4.4,-1.75) 38(4.4,-1.25) 39(4.4,-0.75) 40(4.4,-0.25) 41(4.4,0.25) 42(4.4,0.75) 43(4.4,1.25) 44(4.4,1.75) 45(4.4,2.25) 46(4.4,2.75) 47(4.4,3.25) 48(4.4,3.75)
  oval 0.25x0.6 smd paste+0 mask+0.05: 17(-3.75,-4.4) 18(-3.25,-4.4) 19(-2.75,-4.4) 20(-2.25,-4.4) 21(-1.75,-4.4) 22(-1.25,-4.4) 23(-0.75,-4.4) 24(-0.25,-4.4) 25(0.25,-4.4) 26(0.75,-4.4) 27(1.25,-4.4) 28(1.75,-4.4) 29(2.25,-4.4) 30(2.75,-4.4) 31(3.25,-4.4) 32(3.75,-4.4) 49(3.75,4.4) 50(3.25,4.4) 51(2.75,4.4) 52(2.25,4.4) 53(1.75,4.4) 54(1.25,4.4) 55(0.75,4.4) 56(0.25,4.4) 57(-0.25,4.4) 58(-0.75,4.4) 59(-1.25,4.4) 60(-1.75,4.4) 61(-2.25,4.4) 62(-2.75,4.4) 63(-3.25,4.4) 64(-3.75,4.4)
  rrect5% 7.2x7.2 smd paste-50 mask+0.05: EP(0,0)
Top Overlay:
  circle w0.25: c-5.375,4.575 r0.125
  lines w0.2: -4.725,-4.275 -4.725,-4.725 -4.275,-4.725 ; -4.725,4.275 -4.725,4.725 -4.275,4.725 ; 4.275,-4.725 4.725,-4.725 4.725,-4.275 ; 4.275,4.725 4.725,4.725 4.725,4.275
Top Paste:
  region: 0.55,0.55 -0.55,0.55 -0.55,-0.55 0.55,-0.55
  region: -0.85,0.55 -1.95,0.55 -1.95,-0.55 -0.85,-0.55
  region: -2.25,0.55 -3.35,0.55 -3.35,-0.55 -2.25,-0.55
  rectangle: 0.85,-0.55 1.95,0.55
  rectangle: 2.25,-0.55 3.35,0.55
  region: 0.55,1.95 -0.55,1.95 -0.55,0.85 0.55,0.85
  region: -0.85,1.95 -1.95,1.95 -1.95,0.85 -0.85,0.85
  region: -2.25,1.95 -3.35,1.95 -3.35,0.85 -2.25,0.85
  rectangle: 0.85,0.85 1.95,1.95
  rectangle: 2.25,0.85 3.35,1.95
  region: 0.55,3.35 -0.55,3.35 -0.55,2.25 0.55,2.25
  region: -0.85,3.35 -1.95,3.35 -1.95,2.25 -0.85,2.25
  region: -2.25,3.35 -3.35,3.35 -3.35,2.25 -2.25,2.25
  rectangle: 0.85,2.25 1.95,3.35
  rectangle: 2.25,2.25 3.35,3.35
  rectangle: -0.55,-1.95 0.55,-0.85
  rectangle: 0.85,-1.95 1.95,-0.85
  rectangle: 2.25,-1.95 3.35,-0.85
  region: -0.85,-0.85 -1.95,-0.85 -1.95,-1.95 -0.85,-1.95
  region: -2.25,-0.85 -3.35,-0.85 -3.35,-1.95 -2.25,-1.95
  rectangle: -0.55,-3.35 0.55,-2.25
  rectangle: 0.85,-3.35 1.95,-2.25
  rectangle: 2.25,-3.35 3.35,-2.25
  region: -0.85,-2.25 -1.95,-2.25 -1.95,-3.35 -0.85,-3.35
  region: -2.25,-2.25 -3.35,-2.25 -3.35,-3.35 -2.25,-3.35
Top Courtyard:
  lines w0.025: -5.2,-4.15 -4.75,-4.15 -4.75,-4.75 -4.15,-4.75 -4.15,-5.2 4.15,-5.2 4.15,-4.75 4.75,-4.75 4.75,-4.15 5.2,-4.15 5.2,4.15 4.75,4.15 4.75,4.75 4.15,4.75 4.15,5.2 -4.15,5.2 -4.15,4.75 -4.75,4.75 -4.75,4.15 -5.2,4.15 -5.2,-4.15
Top Assembly:
  drawing of 197 lines, arcs and shapes, not listed
  text ".Designator" at -6.763,-0.679 h3
3D body "QFN64_NKD0064A.x_t": height 0.82, standoff 0, extent -4.52,-4.52 4.52,4.52

## QFN64_USB2517 [mm] "QFN64 9mm x 9mm, 0.5mm pitch"
height 1
pads (65):
  rect 0.7x0.28 smd paste+0 mask+0.05: 1(-4.45,3.75)
  oval 0.7x0.28 smd paste+0 mask+0.05: 2(-4.45,3.25) 3(-4.45,2.75) 4(-4.45,2.25) 5(-4.45,1.75) 6(-4.45,1.25) 7(-4.45,0.75) 8(-4.45,0.25) 9(-4.45,-0.25) 10(-4.45,-0.75) 11(-4.45,-1.25) 12(-4.45,-1.75) 13(-4.45,-2.25) 14(-4.45,-2.75) 15(-4.45,-3.25) 16(-4.45,-3.75) 33(4.45,-3.75) 34(4.45,-3.25) 35(4.45,-2.75) 36(4.45,-2.25) 37(4.45,-1.75) 38(4.45,-1.25) 39(4.45,-0.75) 40(4.45,-0.25) 41(4.45,0.25) 42(4.45,0.75) 43(4.45,1.25) 44(4.45,1.75) 45(4.45,2.25) 46(4.45,2.75) 47(4.45,3.25) 48(4.45,3.75)
  oval 0.28x0.7 smd paste+0 mask+0.05: 17(-3.75,-4.45) 18(-3.25,-4.45) 19(-2.75,-4.45) 20(-2.25,-4.45) 21(-1.75,-4.45) 22(-1.25,-4.45) 23(-0.75,-4.45) 24(-0.25,-4.45) 25(0.25,-4.45) 26(0.75,-4.45) 27(1.25,-4.45) 28(1.75,-4.45) 29(2.25,-4.45) 30(2.75,-4.45) 31(3.25,-4.45) 32(3.75,-4.45) 49(3.75,4.45) 50(3.25,4.45) 51(2.75,4.45) 52(2.25,4.45) 53(1.75,4.45) 54(1.25,4.45) 55(0.75,4.45) 56(0.25,4.45) 57(-0.25,4.45) 58(-0.75,4.45) 59(-1.25,4.45) 60(-1.75,4.45) 61(-2.25,4.45) 62(-2.75,4.45) 63(-3.25,4.45) 64(-3.75,4.45)
  rrect10% 4.7x4.7 smd paste-50 mask+0.05: EP(0,0)
Top Overlay:
  circle w0.25: c-5.375,4.575 r0.125
  lines w0.2: -4.725,-4.725 -4.275,-4.725 -4.725,-4.275 -4.725,-4.725 ; -4.725,4.275 -4.275,4.725 -4.725,4.725 -4.725,4.275 ; 4.275,-4.725 4.725,-4.275 4.725,-4.725 4.275,-4.725 ; 4.275,4.725 4.725,4.275 4.725,4.725 4.275,4.725
Top Paste:
  region: 2.25,1.35 2.25,2.25 1.35,2.25 1.35,1.35
  region: 1.05,1.35 1.05,2.25 0.15,2.25 0.15,1.35
  region: -1.35,1.35 -1.35,2.25 -2.25,2.25 -2.25,1.35
  region: -0.15,1.35 -0.15,2.25 -1.05,2.25 -1.05,1.35
  region: 2.25,0.15 2.25,1.05 1.35,1.05 1.35,0.15
  region: 1.05,0.15 1.05,1.05 0.15,1.05 0.15,0.15
  region: -1.35,0.15 -1.35,1.05 -2.25,1.05 -2.25,0.15
  region: -0.15,0.15 -0.15,1.05 -1.05,1.05 -1.05,0.15
  region: 2.25,-2.25 2.25,-1.35 1.35,-1.35 1.35,-2.25
  region: 1.05,-2.25 1.05,-1.35 0.15,-1.35 0.15,-2.25
  region: -1.35,-2.25 -1.35,-1.35 -2.25,-1.35 -2.25,-2.25
  region: -0.15,-2.25 -0.15,-1.35 -1.05,-1.35 -1.05,-2.25
  region: 2.25,-1.05 2.25,-0.15 1.35,-0.15 1.35,-1.05
  region: 1.05,-1.05 1.05,-0.15 0.15,-0.15 0.15,-1.05
  region: -1.35,-1.05 -1.35,-0.15 -2.25,-0.15 -2.25,-1.05
  region: -0.15,-1.05 -0.15,-0.15 -1.05,-0.15 -1.05,-1.05
Top Courtyard:
  lines w0.025: -5.1,-4.15 -4.75,-4.15 -4.75,-4.75 -4.15,-4.75 -4.15,-5.1 4.15,-5.1 4.15,-4.75 4.75,-4.75 4.75,-4.15 5.1,-4.15 5.1,4.15 4.75,4.15 4.75,4.75 4.15,4.75 4.15,5.1 -4.15,5.1 -4.15,4.75 -4.75,4.75 -4.75,4.15 -5.1,4.15 -5.1,-4.15
Top Assembly:
  drawing of 345 lines, arcs and shapes, not listed
  text ".Designator" at -6.763,-0.679 h3
3D body "QFN64_USB2517.x_t": height 1.01, standoff 0.01, extent -4.51,-4.51 4.51,4.51

## QFN68_HMC7044 [mm] "HCP-68-1 case style"
height 0.9
pads (69):
  rect 1.05x0.25 smd mask+0.05: 1(-4.825,4)
  oval 1.05x0.25 smd mask+0.05: 2(-4.825,3.5) 3(-4.825,3) 4(-4.825,2.5) 5(-4.825,2) 6(-4.825,1.5) 7(-4.825,1) 8(-4.825,0.5) 9(-4.825,0) 10(-4.825,-0.5) 11(-4.825,-1) 12(-4.825,-1.5) 13(-4.825,-2) 14(-4.825,-2.5) 15(-4.825,-3) 16(-4.825,-3.5) 17(-4.825,-4) 35(4.825,-4) 36(4.825,-3.5) 37(4.825,-3) 38(4.825,-2.5) 39(4.825,-2) 40(4.825,-1.5) 41(4.825,-1) 42(4.825,-0.5) 43(4.825,0) 44(4.825,0.5) 45(4.825,1) 46(4.825,1.5) 47(4.825,2) 48(4.825,2.5) 49(4.825,3) 50(4.825,3.5) 51(4.825,4)
  oval 0.25x1.05 smd mask+0.05: 18(-4,-4.825) 19(-3.5,-4.825) 20(-3,-4.825) 21(-2.5,-4.825) 22(-2,-4.825) 23(-1.5,-4.825) 24(-1,-4.825) 25(-0.5,-4.825) 26(0,-4.825) 27(0.5,-4.825) 28(1,-4.825) 29(1.5,-4.825) 30(2,-4.825) 31(2.5,-4.825) 32(3,-4.825) 33(3.5,-4.825) 34(4,-4.825) 52(4,4.825) 53(3.5,4.825) 54(3,4.825) 55(2.5,4.825) 56(2,4.825) 57(1.5,4.825) 58(1,4.825) 59(0.5,4.825) 60(0,4.825) 61(-0.5,4.825) 62(-1,4.825) 63(-1.5,4.825) 64(-2,4.825) 65(-2.5,4.825) 66(-3,4.825) 67(-3.5,4.825) 68(-4,4.825)
  rect 6.3x6.3 smd paste-4 mask+0.05: EP(0,0)
Top Overlay:
  circle w0.25: c-5.85,5.05 r0.125
  lines w0.2: -5.2,-4.525 -5.2,-5.2 -4.525,-5.2 ; -5.2,4.525 -5.2,5.2 -4.525,5.2 ; 4.525,-5.2 5.2,-5.2 5.2,-4.525 ; 4.525,5.2 5.2,5.2 5.2,4.525
Top Paste:
  region: 3.05,-2.55 2.55,-2.55 2.55,-3.05 3.05,-3.05
  region: 2.35,-2.55 1.85,-2.55 1.85,-3.05 2.35,-3.05
  rectangle: -3.05,-3.05 -2.55,-2.55
  region: -1.15,-2.55 -1.65,-2.55 -1.65,-3.05 -1.15,-3.05
  rectangle: -2.35,-3.05 -1.85,-2.55
  region: 1.65,-2.55 1.15,-2.55 1.15,-3.05 1.65,-3.05
  rectangle: 0.45,-3.05 0.95,-2.55
  region: 0.25,-2.55 -0.25,-2.55 -0.25,-3.05 0.25,-3.05
  rectangle: -0.95,-3.05 -0.45,-2.55
  region: 3.05,3.05 2.55,3.05 2.55,2.55 3.05,2.55
  region: 3.05,-1.85 2.55,-1.85 2.55,-2.35 3.05,-2.35
  region: 3.05,-1.15 2.55,-1.15 2.55,-1.65 3.05,-1.65
  region: 3.05,-0.45 2.55,-0.45 2.55,-0.95 3.05,-0.95
  region: 3.05,1.65 2.55,1.65 2.55,1.15 3.05,1.15
  region: 3.05,2.35 2.55,2.35 2.55,1.85 3.05,1.85
  region: 3.05,0.25 2.55,0.25 2.55,-0.25 3.05,-0.25
  region: 3.05,0.95 2.55,0.95 2.55,0.45 3.05,0.45
  region: 2.35,3.05 1.85,3.05 1.85,2.55 2.35,2.55
  region: 2.35,-1.85 1.85,-1.85 1.85,-2.35 2.35,-2.35
  region: 2.35,-1.15 1.85,-1.15 1.85,-1.65 2.35,-1.65
  region: 2.35,-0.45 1.85,-0.45 1.85,-0.95 2.35,-0.95
  region: 2.35,1.65 1.85,1.65 1.85,1.15 2.35,1.15
  region: 2.35,2.35 1.85,2.35 1.85,1.85 2.35,1.85
  region: 2.35,0.25 1.85,0.25 1.85,-0.25 2.35,-0.25
  region: 2.35,0.95 1.85,0.95 1.85,0.45 2.35,0.45
  rectangle: -3.05,-2.35 -2.55,-1.85
  rectangle: -3.05,2.55 -2.55,3.05
  rectangle: -3.05,1.85 -2.55,2.35
  rectangle: -3.05,1.15 -2.55,1.65
  rectangle: -3.05,-0.95 -2.55,-0.45
  rectangle: -3.05,-1.65 -2.55,-1.15
  rectangle: -3.05,0.45 -2.55,0.95
  rectangle: -3.05,-0.25 -2.55,0.25
  region: -1.15,-1.85 -1.65,-1.85 -1.65,-2.35 -1.15,-2.35
  rectangle: -2.35,-2.35 -1.85,-1.85
  region: 1.65,-1.85 1.15,-1.85 1.15,-2.35 1.65,-2.35
  rectangle: 0.45,-2.35 0.95,-1.85
  region: 0.25,-1.85 -0.25,-1.85 -0.25,-2.35 0.25,-2.35
  rectangle: -0.95,-2.35 -0.45,-1.85
  rectangle: 0.45,2.55 0.95,3.05
  region: 1.65,3.05 1.15,3.05 1.15,2.55 1.65,2.55
  rectangle: -2.35,2.55 -1.85,3.05
  region: -1.15,3.05 -1.65,3.05 -1.65,2.55 -1.15,2.55
  rectangle: -0.95,2.55 -0.45,3.05
  region: 0.25,3.05 -0.25,3.05 -0.25,2.55 0.25,2.55
  rectangle: 0.45,1.85 0.95,2.35
  rectangle: 0.45,1.15 0.95,1.65
  region: 1.65,1.65 1.15,1.65 1.15,1.15 1.65,1.15
  region: 1.65,2.35 1.15,2.35 1.15,1.85 1.65,1.85
  rectangle: 0.45,-0.95 0.95,-0.45
  rectangle: 0.45,-1.65 0.95,-1.15
  region: 1.65,-1.15 1.15,-1.15 1.15,-1.65 1.65,-1.65
  region: 1.65,-0.45 1.15,-0.45 1.15,-0.95 1.65,-0.95
  rectangle: 0.45,0.45 0.95,0.95
  rectangle: 0.45,-0.25 0.95,0.25
  region: 1.65,0.25 1.15,0.25 1.15,-0.25 1.65,-0.25
  region: 1.65,0.95 1.15,0.95 1.15,0.45 1.65,0.45
  rectangle: -2.35,1.85 -1.85,2.35
  rectangle: -2.35,1.15 -1.85,1.65
  region: -1.15,1.65 -1.65,1.65 -1.65,1.15 -1.15,1.15
  region: -1.15,2.35 -1.65,2.35 -1.65,1.85 -1.15,1.85
  rectangle: -2.35,-0.95 -1.85,-0.45
  rectangle: -2.35,-1.65 -1.85,-1.15
  region: -1.15,-1.15 -1.65,-1.15 -1.65,-1.65 -1.15,-1.65
  region: -1.15,-0.45 -1.65,-0.45 -1.65,-0.95 -1.15,-0.95
  rectangle: -2.35,0.45 -1.85,0.95
  rectangle: -2.35,-0.25 -1.85,0.25
  region: -1.15,0.25 -1.65,0.25 -1.65,-0.25 -1.15,-0.25
  region: -1.15,0.95 -1.65,0.95 -1.65,0.45 -1.15,0.45
  rectangle: -0.95,1.85 -0.45,2.35
  rectangle: -0.95,1.15 -0.45,1.65
  region: 0.25,1.65 -0.25,1.65 -0.25,1.15 0.25,1.15
  region: 0.25,2.35 -0.25,2.35 -0.25,1.85 0.25,1.85
  rectangle: -0.95,-0.95 -0.45,-0.45
  rectangle: -0.95,-1.65 -0.45,-1.15
  region: 0.25,-1.15 -0.25,-1.15 -0.25,-1.65 0.25,-1.65
  region: 0.25,-0.45 -0.25,-0.45 -0.25,-0.95 0.25,-0.95
  rectangle: -0.95,0.45 -0.45,0.95
  rectangle: -0.95,-0.25 -0.45,0.25
  region: 0.25,0.25 -0.25,0.25 -0.25,-0.25 0.25,-0.25
  region: 0.25,0.95 -0.25,0.95 -0.25,0.45 0.25,0.45
Top Courtyard:
  lines w0.025: -5.6,-4.4 -5.6,4.4 -5.2,4.4 -5.2,5.2 -4.4,5.2 -4.4,5.6 4.4,5.6 4.4,5.2 5.2,5.2 5.2,4.4 5.6,4.4 5.6,-4.4 5.2,-4.4 5.2,-5.2 4.4,-5.2 4.4,-5.6 -4.4,-5.6 -4.4,-5.2 -5.2,-5.2 -5.2,-4.4 -5.6,-4.4
Top Assembly:
  drawing of 209 lines, arcs and shapes, not listed
  text ".Designator" at -6.763,-0.679 h3
3D body "HCP-68-1.x_t": height 0.9, standoff 0, extent -5.025,-5.025 5.025,5.025

## QFN68_LQFP100_CH32V317 [mm] "QFN68, 8x8mm with 0.4mm pitch with LQFP100"
height 0.75
pads (169):
  oval 1.45x0.3 smd paste+0 mask+0.05: 1(-7.725,3.5) 2(-7.725,3) 3(-7.725,2.5) 4(-7.725,2) 5(-7.725,0.5) 6(-7.725,0) 7(-7.725,-0.5) 8(-7.725,-1) 9(-7.725,-1.5) 10(-7.725,-2) 11(-7.725,-2.5) 12(-7.725,-3) 13(-7.725,-4.5) 14(-7.725,-5) 15(-7.725,-5.5) 16(-7.725,-6) 37(7.725,-5.5) 38(7.725,-5) 39(7.725,-4.5) 40(7.725,-4) 43(7.725,2) 44(7.725,2.5) 45(7.725,3) 46(7.725,3.5) 47(7.725,4) 48(7.725,4.5) 49(7.725,5.5) 50(7.725,6) 51(7.725,-6) 61(7.725,-1) 62(7.725,-0.5) 68(-7.725,1) NC(-7.725,-4) NC(-7.725,-3.5) NC(-7.725,1.5) NC(-7.725,4) NC(-7.725,4.5) NC(-7.725,5) NC(-7.725,5.5) NC(7.725,-3.5) NC(7.725,-3) NC(7.725,-2.5) NC(7.725,-2) NC(7.725,-1.5) NC(7.725,0) NC(7.725,0.5) NC(7.725,1) NC(7.725,1.5) NC(7.725,5)
  rect 0.7x0.2 smd paste+0 mask+0.05: 1(-3.95,3.2)
  oval 0.7x0.2 smd paste+0 mask+0.05: 2(-3.95,2.8) 3(-3.95,2.4) 4(-3.95,2) 5(-3.95,1.6) 6(-3.95,1.2) 7(-3.95,0.8) 8(-3.95,0.4) 9(-3.95,0) 10(-3.95,-0.4) 11(-3.95,-0.8) 12(-3.95,-1.2) 13(-3.95,-1.6) 14(-3.95,-2) 15(-3.95,-2.4) 16(-3.95,-2.8) 17(-3.95,-3.2) 35(3.95,-3.2) 36(3.95,-2.8) 37(3.95,-2.4) 38(3.95,-2) 39(3.95,-1.6) 40(3.95,-1.2) 41(3.95,-0.8) 42(3.95,-0.4) 43(3.95,0) 44(3.95,0.4) 45(3.95,0.8) 46(3.95,1.2) 47(3.95,1.6) 48(3.95,2) 49(3.95,2.4) 50(3.95,2.8) 51(3.95,3.2)
  oval 0.3x1.45 smd paste+0 mask+0.05: 17(-6,-7.725) 18(-5,-7.725) 19(-4.5,-7.725) 20(-4,-7.725) 21(-3.5,-7.725) 22(-3,-7.725) 23(-2.5,-7.725) 24(-2,-7.725) 25(-1.5,-7.725) 26(-1,-7.725) 27(-0.5,-7.725) 28(0,-7.725) 29(0.5,-7.725) 30(1,-7.725) 31(2,-7.725) 32(2.5,-7.725) 33(3,-7.725) 34(3.5,-7.725) 35(4,-7.725) 36(5,-7.725) 41(6,-7.725) 42(5.5,-7.725) 52(6,7.725) 53(5.5,7.725) 54(5,7.725) 55(4.5,7.725) 56(4,7.725) 57(2.5,7.725) 58(-0.5,7.725) 59(-1,7.725) 60(-1.5,7.725) 61(-2,7.725) 62(-2.5,7.725) 63(-3,7.725) 64(-3.5,7.725) 65(-4,7.725) 66(-4.5,7.725) 67(-6,7.725) NC(-5.5,-7.725) NC(-5.5,7.725) NC(-5,7.725) NC(0,7.725) NC(0.5,7.725) NC(1,7.725) NC(1.5,-7.725) NC(1.5,7.725) NC(2,7.725) NC(3,7.725) NC(3.5,7.725) NC(4.5,-7.725)
  oval 0.2x0.7 smd paste+0 mask+0.05: 18(-3.2,-3.95) 19(-2.8,-3.95) 20(-2.4,-3.95) 21(-2,-3.95) 22(-1.6,-3.95) 23(-1.2,-3.95) 24(-0.8,-3.95) 25(-0.4,-3.95) 26(0,-3.95) 27(0.4,-3.95) 28(0.8,-3.95) 29(1.2,-3.95) 30(1.6,-3.95) 31(2,-3.95) 32(2.4,-3.95) 33(2.8,-3.95) 34(3.2,-3.95) 52(3.2,3.95) 53(2.8,3.95) 54(2.4,3.95) 55(2,3.95) 56(1.6,3.95) 57(1.2,3.95) 58(0.8,3.95) 59(0.4,3.95) 60(0,3.95) 61(-0.4,3.95) 62(-0.8,3.95) 63(-1.2,3.95) 64(-1.6,3.95) 65(-2,3.95) 66(-2.4,3.95) 67(-2.8,3.95) 68(-3.2,3.95)
  rrect7% 6.7x6.7 smd paste-50 mask+0.05: EP(0,0)
  rect 1.45x0.3 smd paste+0 mask+0.05: NC(-7.725,6)
Top Overlay:
  circle w0.25: c-4.85,4.05 r0.125
  circle w0.25: c-8.125,6.75 r0.125
  circle w0.6: c-5.5,5.5 r0.3
  rectangle: -7.25,6.4 -6.4,7.25
  lines w0.2: -7.15,-6.55 -7.15,-7.15 -6.525,-7.15 ; -4.2,-3.7 -4.2,-4.2 -3.7,-4.2 ; -4.2,3.7 -4.2,4.2 -3.7,4.2 ; 3.7,-4.2 4.2,-4.2 4.2,-3.7 ; 3.7,4.2 4.2,4.2 4.2,3.7 ; 6.525,7.15 7.15,7.15 7.15,6.55 ; 6.55,-7.15 7.15,-7.15 7.15,-6.525
Top Paste:
  region: -2.35,-3.15 -2.35,-2.35 -3.15,-2.35 -3.15,-3.15
  region: -2.35,-2.05 -2.35,-1.25 -3.15,-1.25 -3.15,-2.05
  region: -3.15,3.15 -3.15,2.35 -2.35,2.35 -2.35,3.15
  region: -3.15,2.05 -3.15,1.25 -2.35,1.25 -2.35,2.05
  region: -2.35,-0.95 -2.35,-0.15 -3.15,-0.15 -3.15,-0.95
  region: -3.15,0.95 -3.15,0.15 -2.35,0.15 -2.35,0.95
  region: -1.25,-3.15 -1.25,-2.35 -2.05,-2.35 -2.05,-3.15
  region: -1.25,-2.05 -1.25,-1.25 -2.05,-1.25 -2.05,-2.05
  region: -2.05,3.15 -2.05,2.35 -1.25,2.35 -1.25,3.15
  region: -2.05,2.05 -2.05,1.25 -1.25,1.25 -1.25,2.05
  region: -1.25,-0.95 -1.25,-0.15 -2.05,-0.15 -2.05,-0.95
  region: -2.05,0.95 -2.05,0.15 -1.25,0.15 -1.25,0.95
  region: 3.15,-3.15 3.15,-2.35 2.35,-2.35 2.35,-3.15
  region: 3.15,-2.05 3.15,-1.25 2.35,-1.25 2.35,-2.05
  region: 2.35,3.15 2.35,2.35 3.15,2.35 3.15,3.15
  region: 2.35,2.05 2.35,1.25 3.15,1.25 3.15,2.05
  region: 3.15,-0.95 3.15,-0.15 2.35,-0.15 2.35,-0.95
  region: 2.35,0.95 2.35,0.15 3.15,0.15 3.15,0.95
  region: 2.05,-3.15 2.05,-2.35 1.25,-2.35 1.25,-3.15
  region: 2.05,-2.05 2.05,-1.25 1.25,-1.25 1.25,-2.05
  region: 1.25,3.15 1.25,2.35 2.05,2.35 2.05,3.15
  region: 1.25,2.05 1.25,1.25 2.05,1.25 2.05,2.05
  region: 2.05,-0.95 2.05,-0.15 1.25,-0.15 1.25,-0.95
  region: 1.25,0.95 1.25,0.15 2.05,0.15 2.05,0.95
  region: 0.95,-3.15 0.95,-2.35 0.15,-2.35 0.15,-3.15
  region: -0.15,-3.15 -0.15,-2.35 -0.95,-2.35 -0.95,-3.15
  region: 0.95,-2.05 0.95,-1.25 0.15,-1.25 0.15,-2.05
  region: -0.15,-2.05 -0.15,-1.25 -0.95,-1.25 -0.95,-2.05
  region: -0.95,3.15 -0.95,2.35 -0.15,2.35 -0.15,3.15
  region: 0.15,3.15 0.15,2.35 0.95,2.35 0.95,3.15
  region: -0.95,2.05 -0.95,1.25 -0.15,1.25 -0.15,2.05
  region: 0.15,2.05 0.15,1.25 0.95,1.25 0.95,2.05
  region: 0.95,-0.95 0.95,-0.15 0.15,-0.15 0.15,-0.95
  region: -0.15,-0.95 -0.15,-0.15 -0.95,-0.15 -0.95,-0.95
  region: -0.95,0.95 -0.95,0.15 -0.15,0.15 -0.15,0.95
  region: 0.15,0.95 0.15,0.15 0.95,0.15 0.95,0.95
Top Courtyard:
  lines w0.025: -8.7,-6.4 -7.2,-6.4 -7.2,-7.2 -6.4,-7.2 -6.4,-8.7 6.4,-8.7 6.4,-7.2 7.2,-7.2 7.2,-6.4 8.7,-6.4 8.7,6.4 7.2,6.4 7.2,7.2 6.4,7.2 6.4,8.7 -6.4,8.7 -6.4,7.2 -7.2,7.2 -7.2,6.4 -8.7,6.4 -8.7,-6.4 ; -4.55,-3.55 -4.25,-3.55 -4.25,-4.25 -3.55,-4.25 -3.55,-4.55 3.55,-4.55 3.55,-4.25 4.25,-4.25 4.25,-3.55 4.55,-3.55 4.55,3.55 4.25,3.55 4.25,4.25 3.55,4.25 3.55,4.55 -3.55,4.55 -3.55,4.25 -4.25,4.25 -4.25,3.55 -4.55,3.55 -4.55,-3.55
Top Assembly:
  drawing of 934 lines, arcs and shapes, not listed
  text ".Designator" at -4.511,-0.453 h2
3D body "QFN-68_WCH.x_t": height 0.78, standoff 0, extent -4.025,-4.025 4.025,4.025

## QFN68_RK8xx [mm] "Power QFN 7mm x 7mm, 0.35mm pitch, for RockChip PMIC RK8xx"
pads (69):
  rect 0.6x0.2 smd paste+0 mask+0.025: 1(-3.4,2.8)
  rrect50% 0.6x0.2 smd paste+0 mask+0.025: 2(-3.4,2.45) 3(-3.4,2.1) 4(-3.4,1.75) 5(-3.4,1.4) 6(-3.4,1.05) 7(-3.4,0.7) 8(-3.4,0.35) 9(-3.4,0) 10(-3.4,-0.35) 11(-3.4,-0.7) 12(-3.4,-1.05) 13(-3.4,-1.4) 14(-3.4,-1.75) 15(-3.4,-2.1) 16(-3.4,-2.45) 17(-3.4,-2.8) 35(3.4,-2.8) 36(3.4,-2.45) 37(3.4,-2.1) 38(3.4,-1.75) 39(3.4,-1.4) 40(3.4,-1.05) 41(3.4,-0.7) 42(3.4,-0.35) 43(3.4,0) 44(3.4,0.35) 45(3.4,0.7) 46(3.4,1.05) 47(3.4,1.4) 48(3.4,1.75) 49(3.4,2.1) 50(3.4,2.45) 51(3.4,2.8)
  rrect50% 0.2x0.6 smd paste+0 mask+0.025: 18(-2.8,-3.4) 19(-2.45,-3.4) 20(-2.1,-3.4) 21(-1.75,-3.4) 22(-1.4,-3.4) 23(-1.05,-3.4) 24(-0.7,-3.4) 25(-0.35,-3.4) 26(0,-3.4) 27(0.35,-3.4) 28(0.7,-3.4) 29(1.05,-3.4) 30(1.4,-3.4) 31(1.75,-3.4) 32(2.1,-3.4) 33(2.45,-3.4) 34(2.8,-3.4) 52(2.8,3.4) 53(2.45,3.4) 54(2.1,3.4) 55(1.75,3.4) 56(1.4,3.4) 57(1.05,3.4) 58(0.7,3.4) 59(0.35,3.4) 60(0,3.4) 61(-0.35,3.4) 62(-0.7,3.4) 63(-1.05,3.4) 64(-1.4,3.4) 65(-1.75,3.4) 66(-2.1,3.4) 67(-2.45,3.4) 68(-2.8,3.4)
  rrect5% 5.6x5.6 smd paste-3 mask+0.05: EP(0,0)
Top Overlay:
  circle w0.2: c-4.2,2.8 r0.1
  lines w0.2: -3.7,-3.2 -3.7,-3.7 -3.2,-3.7 ; -3.7,3.2 -3.7,3.7 -3.2,3.7 ; 3.2,-3.7 3.7,-3.7 3.7,-3.2 ; 3.2,3.7 3.7,3.7 3.7,3.2
Top Paste:
  region: 0.9,2.3 0.9,1.7 1.5,1.7 1.5,2.3
  region: 0.1,2.3 0.1,1.7 0.7,1.7 0.7,2.3
  region: -0.7,2.3 -0.7,1.7 -0.1,1.7 -0.1,2.3
  region: 0.1,1.5 0.1,0.9 0.7,0.9 0.7,1.5
  region: 1.7,1.5 1.7,0.9 2.3,0.9 2.3,1.5
  region: 1.7,0.7 1.7,0.1 2.3,0.1 2.3,0.7
  region: 1.7,-0.1 1.7,-0.7 2.3,-0.7 2.3,-0.1
  region: 1.7,-0.9 1.7,-1.5 2.3,-1.5 2.3,-0.9
  region: 0.9,0.7 0.9,0.1 1.5,0.1 1.5,0.7
  region: 1.5,-0.1 0.9,-0.1 0.9,-0.7 1.5,-0.7
  region: 2.3,-1.7 1.7,-1.7 1.7,-2.3 2.3,-2.3
  region: 1.5,-1.7 0.9,-1.7 0.9,-2.3 1.5,-2.3
  region: 0.7,-1.7 0.1,-1.7 0.1,-2.3 0.7,-2.3
  region: -0.1,-1.7 -0.7,-1.7 -0.7,-2.3 -0.1,-2.3
  region: 0.7,-0.9 0.1,-0.9 0.1,-1.5 0.7,-1.5
  region: 1.5,-0.9 0.9,-0.9 0.9,-1.5 1.5,-1.5
  region: -0.9,-2.3 -0.9,-1.7 -1.5,-1.7 -1.5,-2.3
  region: -0.1,-1.5 -0.1,-0.9 -0.7,-0.9 -0.7,-1.5
  region: -1.7,-2.3 -1.7,-1.7 -2.3,-1.7 -2.3,-2.3
  region: -0.9,-1.5 -0.9,-0.9 -1.5,-0.9 -1.5,-1.5
  region: -1.7,-1.5 -1.7,-0.9 -2.3,-0.9 -2.3,-1.5
  region: -1.7,-0.7 -1.7,-0.1 -2.3,-0.1 -2.3,-0.7
  region: -1.7,0.1 -1.7,0.7 -2.3,0.7 -2.3,0.1
  region: -1.7,0.9 -1.7,1.5 -2.3,1.5 -2.3,0.9
  region: -0.9,-0.7 -0.9,-0.1 -1.5,-0.1 -1.5,-0.7
  region: -0.9,0.1 -0.9,0.7 -1.5,0.7 -1.5,0.1
  rectangle: -1.5,1.7 -0.9,2.3
  rectangle: -0.7,0.9 -0.1,1.5
  rectangle: -2.3,1.7 -1.7,2.3
  rectangle: -1.5,0.9 -0.9,1.5
  region: 2.3,2.3 1.7,2.3 1.7,1.7 2.3,1.7
  region: 1.5,1.5 0.9,1.5 0.9,0.9 1.5,0.9
  region: -0.1,-0.1 -0.7,-0.1 -0.7,-0.7 -0.1,-0.7
  region: 0.7,-0.1 0.1,-0.1 0.1,-0.7 0.7,-0.7
  region: -0.1,0.7 -0.7,0.7 -0.7,0.1 -0.1,0.1
  region: 0.7,0.7 0.1,0.7 0.1,0.1 0.7,0.1
Top Courtyard:
  lines w0.025: -3.95,-3.15 -3.75,-3.15 -3.75,-3.75 -3.15,-3.75 -3.15,-3.95 3.15,-3.95 3.15,-3.75 3.75,-3.75 3.75,-3.15 3.95,-3.15 3.95,3.15 3.75,3.15 3.75,3.75 3.15,3.75 3.15,3.95 -3.15,3.95 -3.15,3.75 -3.75,3.75 -3.75,3.15 -3.95,3.15 -3.95,-3.15
Top Assembly:
  drawing of 481 lines, arcs and shapes, not listed
  text ".Designator" at -6.763,-0.679 h3
3D body "QFN68_RK808.x_t": height 0.78, standoff -0.01, extent -3.525,-3.525 3.525,3.525